# Altium footprint library WR-FPC_0.50mm.PcbLib: 147 footprints (part 2 of 10)
Each footprint in its own frame and in the unit in brackets; x right, y up, seen from the top. Pads: shape width x height; smd on the part's side, far side on the other; paste and mask are expansions set on the pad; w line width, h text height; cw(c..) or ccw(c..) is an arc to the next point about the centre after c.
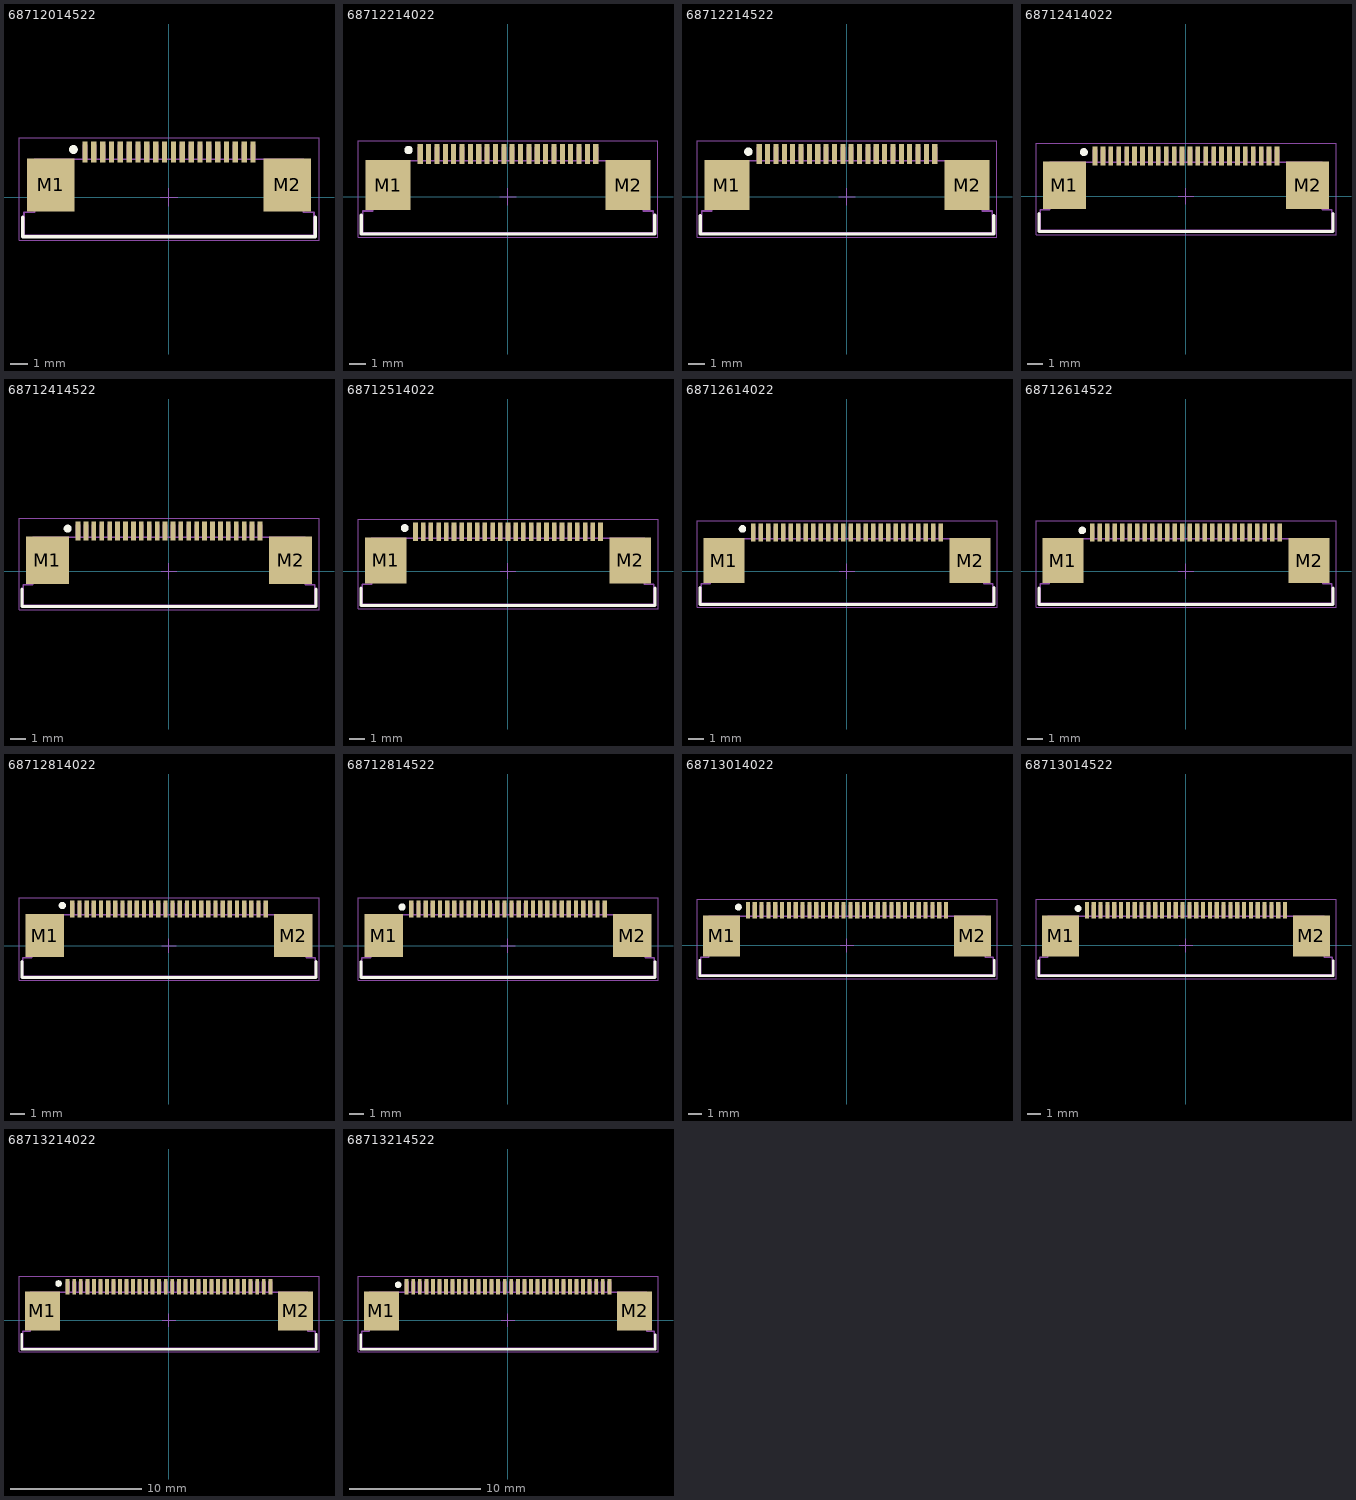
[diagram p1: the footprints below, top view; thin cyan lines are the x and y axes]

## 68712014522 [mm] "ZIF Connectors, Horizontal, Bottom Contact, pitch 0.5mm, 20p"
height 2.25
pads (22):
  rect 0.3x1.2 smd: 1(-4.75,2.56) 2(-4.25,2.56) 3(-3.75,2.56) 4(-3.25,2.56) 5(-2.75,2.56) 6(-2.25,2.56) 7(-1.75,2.56) 8(-1.25,2.56) 9(-0.75,2.56) 10(-0.25,2.56) 11(0.25,2.56) 12(0.75,2.56) 13(1.25,2.56) 14(1.75,2.56) 15(2.25,2.56) 16(2.75,2.56) 17(3.25,2.56) 18(3.75,2.56) 19(4.25,2.56) 20(4.75,2.56)
  rect 2.7x3 smd: M1(-6.68,0.7) M2(6.68,0.7)
Top Overlay:
  circle w0.25: c-5.4,2.7 r0.125
  lines w0.2: -8.275,-1.125 -8.275,-2.225 8.275,-2.225 8.275,-1.125
Top Designator:
  text ".Designator" at -7.498,-0.5 h1.5
Top Component Outline:
  lines w0.1: -4.85,2.15 -4.85,2.95 -4.65,2.95 -4.65,2.15 ; -4.35,2.15 -4.35,2.95 -4.15,2.95 -4.15,2.15 ; -3.85,2.15 -3.85,2.95 -3.65,2.95 -3.65,2.15 ; -3.35,2.15 -3.35,2.95 -3.15,2.95 -3.15,2.15 ; -2.85,2.15 -2.85,2.95 -2.65,2.95 -2.65,2.15 ; -2.35,2.15 -2.35,2.95 -2.15,2.95 -2.15,2.15 ; -1.85,2.15 -1.85,2.95 -1.65,2.95 -1.65,2.15 ; -1.35,2.15 -1.35,2.95 -1.15,2.95 -1.15,2.15 ; -0.85,2.15 -0.85,2.95 -0.65,2.95 -0.65,2.15 ; -0.35,2.15 -0.35,2.95 -0.15,2.95 -0.15,2.15 ; 0.15,2.15 0.15,2.95 0.35,2.95 0.35,2.15 ; 0.65,2.15 0.65,2.95 0.85,2.95 0.85,2.15 ; 1.15,2.15 1.15,2.95 1.35,2.95 1.35,2.15 ; 1.65,2.15 1.65,2.95 1.85,2.95 1.85,2.15 ; 2.15,2.15 2.15,2.95 2.35,2.95 2.35,2.15 ; 2.65,2.15 2.65,2.95 2.85,2.95 2.85,2.15 ; 3.15,2.15 3.15,2.95 3.35,2.95 3.35,2.15 ; 3.65,2.15 3.65,2.95 3.85,2.95 3.85,2.15 ; 4.15,2.15 4.15,2.95 4.35,2.95 4.35,2.15 ; 4.65,2.15 4.65,2.95 4.85,2.95 4.85,2.15 ; -8.2,-2.15 -8.2,-0.85 -7.6,-0.85 -7.6,2.15 7.6,2.15 7.6,-0.85 8.2,-0.85 8.2,-2.15 -8.2,-2.15
Top 3D Body:
  lines w0.1: -4.85,2.15 -4.85,2.95 -4.65,2.95 -4.65,2.15 ; -4.35,2.15 -4.35,2.95 -4.15,2.95 -4.15,2.15 ; -3.85,2.15 -3.85,2.95 -3.65,2.95 -3.65,2.15 ; -3.35,2.15 -3.35,2.95 -3.15,2.95 -3.15,2.15 ; -2.85,2.15 -2.85,2.95 -2.65,2.95 -2.65,2.15 ; -2.35,2.15 -2.35,2.95 -2.15,2.95 -2.15,2.15 ; -1.85,2.15 -1.85,2.95 -1.65,2.95 -1.65,2.15 ; -1.35,2.15 -1.35,2.95 -1.15,2.95 -1.15,2.15 ; -0.85,2.15 -0.85,2.95 -0.65,2.95 -0.65,2.15 ; -0.35,2.15 -0.35,2.95 -0.15,2.95 -0.15,2.15 ; 0.15,2.15 0.15,2.95 0.35,2.95 0.35,2.15 ; 0.65,2.15 0.65,2.95 0.85,2.95 0.85,2.15 ; 1.15,2.15 1.15,2.95 1.35,2.95 1.35,2.15 ; 1.65,2.15 1.65,2.95 1.85,2.95 1.85,2.15 ; 2.15,2.15 2.15,2.95 2.35,2.95 2.35,2.15 ; 2.65,2.15 2.65,2.95 2.85,2.95 2.85,2.15 ; 3.15,2.15 3.15,2.95 3.35,2.95 3.35,2.15 ; 3.65,2.15 3.65,2.95 3.85,2.95 3.85,2.15 ; 4.15,2.15 4.15,2.95 4.35,2.95 4.35,2.15 ; 4.65,2.15 4.65,2.95 4.85,2.95 4.85,2.15 ; -8.2,-2.15 8.2,-2.15 8.2,-0.85 7.6,-0.85 7.6,2.15 -7.6,2.15 -7.6,-0.85 -8.2,-0.85 -8.2,-2.15
Top Courtyard:
  lines w0.05: -0.5,0 0.5,0 ; 0,-0.5 0,0.5 ; -8.475,-2.425 8.475,-2.425 8.475,3.36 -8.475,3.36 -8.475,-2.425
3D body "68712014522.stp": height 2.1, standoff 0, extent -8.2,-2.15 8.2,2.95

## 68712214022 [mm] "ZIF Connectors, Horizontal, Top Contact, pitch 0.5mm, 22p"
height 2.25
pads (24):
  rect 0.3x1.2 smd: 1(-5.25,2.56) 2(-4.75,2.56) 3(-4.25,2.56) 4(-3.75,2.56) 5(-3.25,2.56) 6(-2.75,2.56) 7(-2.25,2.56) 8(-1.75,2.56) 9(-1.25,2.56) 10(-0.75,2.56) 11(-0.25,2.56) 12(0.25,2.56) 13(0.75,2.56) 14(1.25,2.56) 15(1.75,2.56) 16(2.25,2.56) 17(2.75,2.56) 18(3.25,2.56) 19(3.75,2.56) 20(4.25,2.56) 21(4.75,2.56) 22(5.25,2.56)
  rect 2.7x3 smd: M1(-7.18,0.7) M2(7.18,0.7)
Top Overlay:
  circle w0.25: c-5.95,2.8 r0.125
  lines w0.2: -8.775,-1.1 -8.775,-2.225 8.775,-2.225 8.775,-1.1
Top Designator:
  text ".Designator" at -7.498,-0.5 h1.5
Top Component Outline:
  lines w0.1: -5.35,2.15 -5.35,2.95 -5.15,2.95 -5.15,2.15 ; -4.85,2.15 -4.85,2.95 -4.65,2.95 -4.65,2.15 ; -4.35,2.15 -4.35,2.95 -4.15,2.95 -4.15,2.15 ; -3.85,2.15 -3.85,2.95 -3.65,2.95 -3.65,2.15 ; -3.35,2.15 -3.35,2.95 -3.15,2.95 -3.15,2.15 ; -2.85,2.15 -2.85,2.95 -2.65,2.95 -2.65,2.15 ; -2.35,2.15 -2.35,2.95 -2.15,2.95 -2.15,2.15 ; -1.85,2.15 -1.85,2.95 -1.65,2.95 -1.65,2.15 ; -1.35,2.15 -1.35,2.95 -1.15,2.95 -1.15,2.15 ; -0.85,2.15 -0.85,2.95 -0.65,2.95 -0.65,2.15 ; -0.35,2.15 -0.35,2.95 -0.15,2.95 -0.15,2.15 ; 0.15,2.15 0.15,2.95 0.35,2.95 0.35,2.15 ; 0.65,2.15 0.65,2.95 0.85,2.95 0.85,2.15 ; 1.15,2.15 1.15,2.95 1.35,2.95 1.35,2.15 ; 1.65,2.15 1.65,2.95 1.85,2.95 1.85,2.15 ; 2.15,2.15 2.15,2.95 2.35,2.95 2.35,2.15 ; 2.65,2.15 2.65,2.95 2.85,2.95 2.85,2.15 ; 3.15,2.15 3.15,2.95 3.35,2.95 3.35,2.15 ; 3.65,2.15 3.65,2.95 3.85,2.95 3.85,2.15 ; 4.15,2.15 4.15,2.95 4.35,2.95 4.35,2.15 ; 4.65,2.15 4.65,2.95 4.85,2.95 4.85,2.15 ; 5.15,2.15 5.15,2.95 5.35,2.95 5.35,2.15 ; -8.7,-2.15 -8.7,-0.85 -8.1,-0.85 -8.1,2.15 8.1,2.15 8.1,-0.85 8.7,-0.85 8.7,-2.15 -8.7,-2.15
Top 3D Body:
  lines w0.1: -5.35,2.15 -5.35,2.95 -5.15,2.95 -5.15,2.15 ; -4.85,2.15 -4.85,2.95 -4.65,2.95 -4.65,2.15 ; -4.35,2.15 -4.35,2.95 -4.15,2.95 -4.15,2.15 ; -3.85,2.15 -3.85,2.95 -3.65,2.95 -3.65,2.15 ; -3.35,2.15 -3.35,2.95 -3.15,2.95 -3.15,2.15 ; -2.85,2.15 -2.85,2.95 -2.65,2.95 -2.65,2.15 ; -2.35,2.15 -2.35,2.95 -2.15,2.95 -2.15,2.15 ; -1.85,2.15 -1.85,2.95 -1.65,2.95 -1.65,2.15 ; -1.35,2.15 -1.35,2.95 -1.15,2.95 -1.15,2.15 ; -0.85,2.15 -0.85,2.95 -0.65,2.95 -0.65,2.15 ; -0.35,2.15 -0.35,2.95 -0.15,2.95 -0.15,2.15 ; 0.15,2.15 0.15,2.95 0.35,2.95 0.35,2.15 ; 0.65,2.15 0.65,2.95 0.85,2.95 0.85,2.15 ; 1.15,2.15 1.15,2.95 1.35,2.95 1.35,2.15 ; 1.65,2.15 1.65,2.95 1.85,2.95 1.85,2.15 ; 2.15,2.15 2.15,2.95 2.35,2.95 2.35,2.15 ; 2.65,2.15 2.65,2.95 2.85,2.95 2.85,2.15 ; 3.15,2.15 3.15,2.95 3.35,2.95 3.35,2.15 ; 3.65,2.15 3.65,2.95 3.85,2.95 3.85,2.15 ; 4.15,2.15 4.15,2.95 4.35,2.95 4.35,2.15 ; 4.65,2.15 4.65,2.95 4.85,2.95 4.85,2.15 ; 5.15,2.15 5.15,2.95 5.35,2.95 5.35,2.15 ; -8.7,-2.15 8.7,-2.15 8.7,-0.85 8.1,-0.85 8.1,2.15 -8.1,2.15 -8.1,-0.85 -8.7,-0.85 -8.7,-2.15
Top Courtyard:
  lines w0.05: -0.5,0 0.5,0 ; 0,-0.5 0,0.5 ; -8.975,-2.425 -8.975,3.36 8.975,3.36 8.975,-2.425 -8.975,-2.425
3D body "68712214022.stp": height 2.1, standoff 0, extent -8.7,-2.15 8.7,2.95

## 68712214522 [mm] "ZIF Connectors, Horizontal, Bottom Contact, pitch 0.5mm, 22p"
height 2.25
pads (24):
  rect 0.3x1.2 smd: 1(-5.25,2.56) 2(-4.75,2.56) 3(-4.25,2.56) 4(-3.75,2.56) 5(-3.25,2.56) 6(-2.75,2.56) 7(-2.25,2.56) 8(-1.75,2.56) 9(-1.25,2.56) 10(-0.75,2.56) 11(-0.25,2.56) 12(0.25,2.56) 13(0.75,2.56) 14(1.25,2.56) 15(1.75,2.56) 16(2.25,2.56) 17(2.75,2.56) 18(3.25,2.56) 19(3.75,2.56) 20(4.25,2.56) 21(4.75,2.56) 22(5.25,2.56)
  rect 2.7x3 smd: M1(-7.18,0.7) M2(7.18,0.7)
Top Overlay:
  circle w0.25: c-5.9,2.7 r0.125
  lines w0.2: -8.775,-1.125 -8.775,-2.225 8.775,-2.225 8.775,-1.125
Top Designator:
  text ".Designator" at -7.498,-0.5 h1.5
Top Component Outline:
  lines w0.1: -5.35,2.15 -5.35,2.95 -5.15,2.95 -5.15,2.15 ; -4.85,2.15 -4.85,2.95 -4.65,2.95 -4.65,2.15 ; -4.35,2.15 -4.35,2.95 -4.15,2.95 -4.15,2.15 ; -3.85,2.15 -3.85,2.95 -3.65,2.95 -3.65,2.15 ; -3.35,2.15 -3.35,2.95 -3.15,2.95 -3.15,2.15 ; -2.85,2.15 -2.85,2.95 -2.65,2.95 -2.65,2.15 ; -2.35,2.15 -2.35,2.95 -2.15,2.95 -2.15,2.15 ; -1.85,2.15 -1.85,2.95 -1.65,2.95 -1.65,2.15 ; -1.35,2.15 -1.35,2.95 -1.15,2.95 -1.15,2.15 ; -0.85,2.15 -0.85,2.95 -0.65,2.95 -0.65,2.15 ; -0.35,2.15 -0.35,2.95 -0.15,2.95 -0.15,2.15 ; 0.15,2.15 0.15,2.95 0.35,2.95 0.35,2.15 ; 0.65,2.15 0.65,2.95 0.85,2.95 0.85,2.15 ; 1.15,2.15 1.15,2.95 1.35,2.95 1.35,2.15 ; 1.65,2.15 1.65,2.95 1.85,2.95 1.85,2.15 ; 2.15,2.15 2.15,2.95 2.35,2.95 2.35,2.15 ; 2.65,2.15 2.65,2.95 2.85,2.95 2.85,2.15 ; 3.15,2.15 3.15,2.95 3.35,2.95 3.35,2.15 ; 3.65,2.15 3.65,2.95 3.85,2.95 3.85,2.15 ; 4.15,2.15 4.15,2.95 4.35,2.95 4.35,2.15 ; 4.65,2.15 4.65,2.95 4.85,2.95 4.85,2.15 ; 5.15,2.15 5.15,2.95 5.35,2.95 5.35,2.15 ; -8.7,-2.15 -8.7,-0.85 -8.1,-0.85 -8.1,2.15 8.1,2.15 8.1,-0.85 8.7,-0.85 8.7,-2.15 -8.7,-2.15
Top 3D Body:
  lines w0.1: -5.35,2.15 -5.35,2.95 -5.15,2.95 -5.15,2.15 ; -4.85,2.15 -4.85,2.95 -4.65,2.95 -4.65,2.15 ; -4.35,2.15 -4.35,2.95 -4.15,2.95 -4.15,2.15 ; -3.85,2.15 -3.85,2.95 -3.65,2.95 -3.65,2.15 ; -3.35,2.15 -3.35,2.95 -3.15,2.95 -3.15,2.15 ; -2.85,2.15 -2.85,2.95 -2.65,2.95 -2.65,2.15 ; -2.35,2.15 -2.35,2.95 -2.15,2.95 -2.15,2.15 ; -1.85,2.15 -1.85,2.95 -1.65,2.95 -1.65,2.15 ; -1.35,2.15 -1.35,2.95 -1.15,2.95 -1.15,2.15 ; -0.85,2.15 -0.85,2.95 -0.65,2.95 -0.65,2.15 ; -0.35,2.15 -0.35,2.95 -0.15,2.95 -0.15,2.15 ; 0.15,2.15 0.15,2.95 0.35,2.95 0.35,2.15 ; 0.65,2.15 0.65,2.95 0.85,2.95 0.85,2.15 ; 1.15,2.15 1.15,2.95 1.35,2.95 1.35,2.15 ; 1.65,2.15 1.65,2.95 1.85,2.95 1.85,2.15 ; 2.15,2.15 2.15,2.95 2.35,2.95 2.35,2.15 ; 2.65,2.15 2.65,2.95 2.85,2.95 2.85,2.15 ; 3.15,2.15 3.15,2.95 3.35,2.95 3.35,2.15 ; 3.65,2.15 3.65,2.95 3.85,2.95 3.85,2.15 ; 4.15,2.15 4.15,2.95 4.35,2.95 4.35,2.15 ; 4.65,2.15 4.65,2.95 4.85,2.95 4.85,2.15 ; 5.15,2.15 5.15,2.95 5.35,2.95 5.35,2.15 ; -8.7,-2.15 8.7,-2.15 8.7,-0.85 8.1,-0.85 8.1,2.15 -8.1,2.15 -8.1,-0.85 -8.7,-0.85 -8.7,-2.15
Top Courtyard:
  lines w0.05: -0.5,0 0.5,0 ; 0,-0.5 0,0.5 ; -8.975,-2.425 8.975,-2.425 8.975,3.36 -8.975,3.36 -8.975,-2.425
3D body "68712214522.stp": height 2.1, standoff 0, extent -8.7,-2.15 8.7,2.95

## 68712414022 [mm] "ZIF Connectors, Horizontal, Top Contact, pitch 0.5mm, 24p"
height 2.25
pads (26):
  rect 0.3x1.2 smd: 1(-5.75,2.56) 2(-5.25,2.56) 3(-4.75,2.56) 4(-4.25,2.56) 5(-3.75,2.56) 6(-3.25,2.56) 7(-2.75,2.56) 8(-2.25,2.56) 9(-1.75,2.56) 10(-1.25,2.56) 11(-0.75,2.56) 12(-0.25,2.56) 13(0.25,2.56) 14(0.75,2.56) 15(1.25,2.56) 16(1.75,2.56) 17(2.25,2.56) 18(2.75,2.56) 19(3.25,2.56) 20(3.75,2.56) 21(4.25,2.56) 22(4.75,2.56) 23(5.25,2.56) 24(5.75,2.56)
  rect 2.7x3 smd: M1(-7.68,0.7) M2(7.68,0.7)
Top Overlay:
  circle w0.25: c-6.45,2.8 r0.125
  lines w0.2: -9.275,-1.1 -9.275,-2.225 9.275,-2.225 9.275,-1.1
Top Designator:
  text ".Designator" at -7.498,-0.5 h1.5
Top Component Outline:
  lines w0.1: -5.85,2.15 -5.85,2.95 -5.65,2.95 -5.65,2.15 ; -5.35,2.15 -5.35,2.95 -5.15,2.95 -5.15,2.15 ; -4.85,2.15 -4.85,2.95 -4.65,2.95 -4.65,2.15 ; -4.35,2.15 -4.35,2.95 -4.15,2.95 -4.15,2.15 ; -3.85,2.15 -3.85,2.95 -3.65,2.95 -3.65,2.15 ; -3.35,2.15 -3.35,2.95 -3.15,2.95 -3.15,2.15 ; -2.85,2.15 -2.85,2.95 -2.65,2.95 -2.65,2.15 ; -2.35,2.15 -2.35,2.95 -2.15,2.95 -2.15,2.15 ; -1.85,2.15 -1.85,2.95 -1.65,2.95 -1.65,2.15 ; -1.35,2.15 -1.35,2.95 -1.15,2.95 -1.15,2.15 ; -0.85,2.15 -0.85,2.95 -0.65,2.95 -0.65,2.15 ; -0.35,2.15 -0.35,2.95 -0.15,2.95 -0.15,2.15 ; 0.15,2.15 0.15,2.95 0.35,2.95 0.35,2.15 ; 0.65,2.15 0.65,2.95 0.85,2.95 0.85,2.15 ; 1.15,2.15 1.15,2.95 1.35,2.95 1.35,2.15 ; 1.65,2.15 1.65,2.95 1.85,2.95 1.85,2.15 ; 2.15,2.15 2.15,2.95 2.35,2.95 2.35,2.15 ; 2.65,2.15 2.65,2.95 2.85,2.95 2.85,2.15 ; 3.15,2.15 3.15,2.95 3.35,2.95 3.35,2.15 ; 3.65,2.15 3.65,2.95 3.85,2.95 3.85,2.15 ; 4.15,2.15 4.15,2.95 4.35,2.95 4.35,2.15 ; 4.65,2.15 4.65,2.95 4.85,2.95 4.85,2.15 ; 5.15,2.15 5.15,2.95 5.35,2.95 5.35,2.15 ; 5.65,2.15 5.65,2.95 5.85,2.95 5.85,2.15 ; -9.2,-2.15 -9.2,-0.85 -8.6,-0.85 -8.6,2.15 8.6,2.15 8.6,-0.85 9.2,-0.85 9.2,-2.15 -9.2,-2.15
Top 3D Body:
  lines w0.1: -5.85,2.15 -5.85,2.95 -5.65,2.95 -5.65,2.15 ; -5.35,2.15 -5.35,2.95 -5.15,2.95 -5.15,2.15 ; -4.85,2.15 -4.85,2.95 -4.65,2.95 -4.65,2.15 ; -4.35,2.15 -4.35,2.95 -4.15,2.95 -4.15,2.15 ; -3.85,2.15 -3.85,2.95 -3.65,2.95 -3.65,2.15 ; -3.35,2.15 -3.35,2.95 -3.15,2.95 -3.15,2.15 ; -2.85,2.15 -2.85,2.95 -2.65,2.95 -2.65,2.15 ; -2.35,2.15 -2.35,2.95 -2.15,2.95 -2.15,2.15 ; -1.85,2.15 -1.85,2.95 -1.65,2.95 -1.65,2.15 ; -1.35,2.15 -1.35,2.95 -1.15,2.95 -1.15,2.15 ; -0.85,2.15 -0.85,2.95 -0.65,2.95 -0.65,2.15 ; -0.35,2.15 -0.35,2.95 -0.15,2.95 -0.15,2.15 ; 0.15,2.15 0.15,2.95 0.35,2.95 0.35,2.15 ; 0.65,2.15 0.65,2.95 0.85,2.95 0.85,2.15 ; 1.15,2.15 1.15,2.95 1.35,2.95 1.35,2.15 ; 1.65,2.15 1.65,2.95 1.85,2.95 1.85,2.15 ; 2.15,2.15 2.15,2.95 2.35,2.95 2.35,2.15 ; 2.65,2.15 2.65,2.95 2.85,2.95 2.85,2.15 ; 3.15,2.15 3.15,2.95 3.35,2.95 3.35,2.15 ; 3.65,2.15 3.65,2.95 3.85,2.95 3.85,2.15 ; 4.15,2.15 4.15,2.95 4.35,2.95 4.35,2.15 ; 4.65,2.15 4.65,2.95 4.85,2.95 4.85,2.15 ; 5.15,2.15 5.15,2.95 5.35,2.95 5.35,2.15 ; 5.65,2.15 5.65,2.95 5.85,2.95 5.85,2.15 ; -9.2,-2.15 9.2,-2.15 9.2,-0.85 8.6,-0.85 8.6,2.15 -8.6,2.15 -8.6,-0.85 -9.2,-0.85 -9.2,-2.15
Top Courtyard:
  lines w0.05: -0.5,0 0.5,0 ; 0,-0.5 0,0.5 ; -9.475,-2.425 -9.475,3.36 9.475,3.36 9.475,-2.425 -9.475,-2.425
3D body "68712414022.stp": height 2.1, standoff 0, extent -9.2,-2.15 9.2,2.95

## 68712414522 [mm] "ZIF Connectors, Horizontal, Bottom Contact, pitch 0.5mm, 24p"
height 2.25
pads (26):
  rect 0.3x1.2 smd: 1(-5.75,2.56) 2(-5.25,2.56) 3(-4.75,2.56) 4(-4.25,2.56) 5(-3.75,2.56) 6(-3.25,2.56) 7(-2.75,2.56) 8(-2.25,2.56) 9(-1.75,2.56) 10(-1.25,2.56) 11(-0.75,2.56) 12(-0.25,2.56) 13(0.25,2.56) 14(0.75,2.56) 15(1.25,2.56) 16(1.75,2.56) 17(2.25,2.56) 18(2.75,2.56) 19(3.25,2.56) 20(3.75,2.56) 21(4.25,2.56) 22(4.75,2.56) 23(5.25,2.56) 24(5.75,2.56)
  rect 2.7x3 smd: M1(-7.68,0.7) M2(7.68,0.7)
Top Overlay:
  circle w0.25: c-6.4,2.7 r0.125
  lines w0.2: -9.275,-1.125 -9.275,-2.225 9.275,-2.225 9.275,-1.125
Top Designator:
  text ".Designator" at -7.498,-0.5 h1.5
Top Component Outline:
  lines w0.1: -5.85,2.15 -5.85,2.95 -5.65,2.95 -5.65,2.15 ; -5.35,2.15 -5.35,2.95 -5.15,2.95 -5.15,2.15 ; -4.85,2.15 -4.85,2.95 -4.65,2.95 -4.65,2.15 ; -4.35,2.15 -4.35,2.95 -4.15,2.95 -4.15,2.15 ; -3.85,2.15 -3.85,2.95 -3.65,2.95 -3.65,2.15 ; -3.35,2.15 -3.35,2.95 -3.15,2.95 -3.15,2.15 ; -2.85,2.15 -2.85,2.95 -2.65,2.95 -2.65,2.15 ; -2.35,2.15 -2.35,2.95 -2.15,2.95 -2.15,2.15 ; -1.85,2.15 -1.85,2.95 -1.65,2.95 -1.65,2.15 ; -1.35,2.15 -1.35,2.95 -1.15,2.95 -1.15,2.15 ; -0.85,2.15 -0.85,2.95 -0.65,2.95 -0.65,2.15 ; -0.35,2.15 -0.35,2.95 -0.15,2.95 -0.15,2.15 ; 0.15,2.15 0.15,2.95 0.35,2.95 0.35,2.15 ; 0.65,2.15 0.65,2.95 0.85,2.95 0.85,2.15 ; 1.15,2.15 1.15,2.95 1.35,2.95 1.35,2.15 ; 1.65,2.15 1.65,2.95 1.85,2.95 1.85,2.15 ; 2.15,2.15 2.15,2.95 2.35,2.95 2.35,2.15 ; 2.65,2.15 2.65,2.95 2.85,2.95 2.85,2.15 ; 3.15,2.15 3.15,2.95 3.35,2.95 3.35,2.15 ; 3.65,2.15 3.65,2.95 3.85,2.95 3.85,2.15 ; 4.15,2.15 4.15,2.95 4.35,2.95 4.35,2.15 ; 4.65,2.15 4.65,2.95 4.85,2.95 4.85,2.15 ; 5.15,2.15 5.15,2.95 5.35,2.95 5.35,2.15 ; 5.65,2.15 5.65,2.95 5.85,2.95 5.85,2.15 ; -9.2,-2.15 9.2,-2.15 9.2,-0.85 8.6,-0.85 8.6,2.15 -8.6,2.15 -8.6,-0.85 -9.2,-0.85 -9.2,-2.15
Top 3D Body:
  lines w0.1: -5.85,2.15 -5.85,2.95 -5.65,2.95 -5.65,2.15 ; -5.35,2.15 -5.35,2.95 -5.15,2.95 -5.15,2.15 ; -4.85,2.15 -4.85,2.95 -4.65,2.95 -4.65,2.15 ; -4.35,2.15 -4.35,2.95 -4.15,2.95 -4.15,2.15 ; -3.85,2.15 -3.85,2.95 -3.65,2.95 -3.65,2.15 ; -3.35,2.15 -3.35,2.95 -3.15,2.95 -3.15,2.15 ; -2.85,2.15 -2.85,2.95 -2.65,2.95 -2.65,2.15 ; -2.35,2.15 -2.35,2.95 -2.15,2.95 -2.15,2.15 ; -1.85,2.15 -1.85,2.95 -1.65,2.95 -1.65,2.15 ; -1.35,2.15 -1.35,2.95 -1.15,2.95 -1.15,2.15 ; -0.85,2.15 -0.85,2.95 -0.65,2.95 -0.65,2.15 ; -0.35,2.15 -0.35,2.95 -0.15,2.95 -0.15,2.15 ; 0.15,2.15 0.15,2.95 0.35,2.95 0.35,2.15 ; 0.65,2.15 0.65,2.95 0.85,2.95 0.85,2.15 ; 1.15,2.15 1.15,2.95 1.35,2.95 1.35,2.15 ; 1.65,2.15 1.65,2.95 1.85,2.95 1.85,2.15 ; 2.15,2.15 2.15,2.95 2.35,2.95 2.35,2.15 ; 2.65,2.15 2.65,2.95 2.85,2.95 2.85,2.15 ; 3.15,2.15 3.15,2.95 3.35,2.95 3.35,2.15 ; 3.65,2.15 3.65,2.95 3.85,2.95 3.85,2.15 ; 4.15,2.15 4.15,2.95 4.35,2.95 4.35,2.15 ; 4.65,2.15 4.65,2.95 4.85,2.95 4.85,2.15 ; 5.15,2.15 5.15,2.95 5.35,2.95 5.35,2.15 ; 5.65,2.15 5.65,2.95 5.85,2.95 5.85,2.15 ; -9.2,-2.15 -9.2,-0.85 -8.6,-0.85 -8.6,2.15 8.6,2.15 8.6,-0.85 9.2,-0.85 9.2,-2.15 -9.2,-2.15
Top Courtyard:
  lines w0.05: -0.5,0 0.5,0 ; 0,-0.5 0,0.5 ; -9.475,-2.425 -9.475,3.36 9.475,3.36 9.475,-2.425 -9.475,-2.425
3D body "68712414522.stp": height 2.1, standoff 0, extent -9.2,-2.15 9.2,2.95

## 68712514022 [mm] "ZIF Connectors, Horizontal, Top Contact, pitch 0.5mm, 25p"
height 2.25
pads (27):
  rect 0.3x1.2 smd: 1(-6,2.56) 2(-5.5,2.56) 3(-5,2.56) 4(-4.5,2.56) 5(-4,2.56) 6(-3.5,2.56) 7(-3,2.56) 8(-2.5,2.56) 9(-2,2.56) 10(-1.5,2.56) 11(-1,2.56) 12(-0.5,2.56) 13(0,2.56) 14(0.5,2.56) 15(1,2.56) 16(1.5,2.56) 17(2,2.56) 18(2.5,2.56) 19(3,2.56) 20(3.5,2.56) 21(4,2.56) 22(4.5,2.56) 23(5,2.56) 24(5.5,2.56) 25(6,2.56)
  rect 2.7x3 smd: M1(-7.93,0.7) M2(7.93,0.7)
Top Overlay:
  circle w0.25: c-6.7,2.8 r0.125
  lines w0.2: -9.525,-1.1 -9.525,-2.225 9.525,-2.225 9.525,-1.1
Top Designator:
  text ".Designator" at -7.498,-0.5 h1.5
Top Component Outline:
  lines w0.1: -6.1,2.15 -6.1,2.95 -5.9,2.95 -5.9,2.15 ; -5.6,2.15 -5.6,2.95 -5.4,2.95 -5.4,2.15 ; -5.1,2.15 -5.1,2.95 -4.9,2.95 -4.9,2.15 ; -4.6,2.15 -4.6,2.95 -4.4,2.95 -4.4,2.15 ; -4.1,2.15 -4.1,2.95 -3.9,2.95 -3.9,2.15 ; -3.6,2.15 -3.6,2.95 -3.4,2.95 -3.4,2.15 ; -3.1,2.15 -3.1,2.95 -2.9,2.95 -2.9,2.15 ; -2.6,2.15 -2.6,2.95 -2.4,2.95 -2.4,2.15 ; -2.1,2.15 -2.1,2.95 -1.9,2.95 -1.9,2.15 ; -1.6,2.15 -1.6,2.95 -1.4,2.95 -1.4,2.15 ; -1.1,2.15 -1.1,2.95 -0.9,2.95 -0.9,2.15 ; -0.6,2.15 -0.6,2.95 -0.4,2.95 -0.4,2.15 ; -0.1,2.15 -0.1,2.95 0.1,2.95 0.1,2.15 ; 0.4,2.15 0.4,2.95 0.6,2.95 0.6,2.15 ; 0.9,2.15 0.9,2.95 1.1,2.95 1.1,2.15 ; 1.4,2.15 1.4,2.95 1.6,2.95 1.6,2.15 ; 1.9,2.15 1.9,2.95 2.1,2.95 2.1,2.15 ; 2.4,2.15 2.4,2.95 2.6,2.95 2.6,2.15 ; 2.9,2.15 2.9,2.95 3.1,2.95 3.1,2.15 ; 3.4,2.15 3.4,2.95 3.6,2.95 3.6,2.15 ; 3.9,2.15 3.9,2.95 4.1,2.95 4.1,2.15 ; 4.4,2.15 4.4,2.95 4.6,2.95 4.6,2.15 ; 4.9,2.15 4.9,2.95 5.1,2.95 5.1,2.15 ; 5.4,2.15 5.4,2.95 5.6,2.95 5.6,2.15 ; 5.9,2.15 5.9,2.95 6.1,2.95 6.1,2.15 ; -9.45,-2.15 -9.45,-0.85 -8.85,-0.85 -8.85,2.15 8.85,2.15 8.85,-0.85 9.45,-0.85 9.45,-2.15 -9.45,-2.15
Top 3D Body:
  lines w0.1: -6.1,2.15 -6.1,2.95 -5.9,2.95 -5.9,2.15 ; -5.6,2.15 -5.6,2.95 -5.4,2.95 -5.4,2.15 ; -5.1,2.15 -5.1,2.95 -4.9,2.95 -4.9,2.15 ; -4.6,2.15 -4.6,2.95 -4.4,2.95 -4.4,2.15 ; -4.1,2.15 -4.1,2.95 -3.9,2.95 -3.9,2.15 ; -3.6,2.15 -3.6,2.95 -3.4,2.95 -3.4,2.15 ; -3.1,2.15 -3.1,2.95 -2.9,2.95 -2.9,2.15 ; -2.6,2.15 -2.6,2.95 -2.4,2.95 -2.4,2.15 ; -2.1,2.15 -2.1,2.95 -1.9,2.95 -1.9,2.15 ; -1.6,2.15 -1.6,2.95 -1.4,2.95 -1.4,2.15 ; -1.1,2.15 -1.1,2.95 -0.9,2.95 -0.9,2.15 ; -0.6,2.15 -0.6,2.95 -0.4,2.95 -0.4,2.15 ; -0.1,2.15 -0.1,2.95 0.1,2.95 0.1,2.15 ; 0.4,2.15 0.4,2.95 0.6,2.95 0.6,2.15 ; 0.9,2.15 0.9,2.95 1.1,2.95 1.1,2.15 ; 1.4,2.15 1.4,2.95 1.6,2.95 1.6,2.15 ; 1.9,2.15 1.9,2.95 2.1,2.95 2.1,2.15 ; 2.4,2.15 2.4,2.95 2.6,2.95 2.6,2.15 ; 2.9,2.15 2.9,2.95 3.1,2.95 3.1,2.15 ; 3.4,2.15 3.4,2.95 3.6,2.95 3.6,2.15 ; 3.9,2.15 3.9,2.95 4.1,2.95 4.1,2.15 ; 4.4,2.15 4.4,2.95 4.6,2.95 4.6,2.15 ; 4.9,2.15 4.9,2.95 5.1,2.95 5.1,2.15 ; 5.4,2.15 5.4,2.95 5.6,2.95 5.6,2.15 ; 5.9,2.15 5.9,2.95 6.1,2.95 6.1,2.15 ; -9.45,-2.15 9.45,-2.15 9.45,-0.85 8.85,-0.85 8.85,2.15 -8.85,2.15 -8.85,-0.85 -9.45,-0.85 -9.45,-2.15
Top Courtyard:
  lines w0.05: -0.5,0 0.5,0 ; 0,-0.5 0,0.5 ; -9.725,-2.425 -9.725,3.36 9.725,3.36 9.725,-2.425 -9.725,-2.425
3D body "68712514022.stp": height 2.1, standoff 0, extent -9.45,-2.15 9.45,2.95

## 68712614022 [mm] "ZIF Connectors, Horizontal, Top Contact, pitch 0.5mm, 26p"
height 2.25
pads (28):
  rect 0.3x1.2 smd: 1(-6.25,2.56) 2(-5.75,2.56) 3(-5.25,2.56) 4(-4.75,2.56) 5(-4.25,2.56) 6(-3.75,2.56) 7(-3.25,2.56) 8(-2.75,2.56) 9(-2.25,2.56) 10(-1.75,2.56) 11(-1.25,2.56) 12(-0.75,2.56) 13(-0.25,2.56) 14(0.25,2.56) 15(0.75,2.56) 16(1.25,2.56) 17(1.75,2.56) 18(2.25,2.56) 19(2.75,2.56) 20(3.25,2.56) 21(3.75,2.56) 22(4.25,2.56) 23(4.75,2.56) 24(5.25,2.56) 25(5.75,2.56) 26(6.25,2.56)
  rect 2.7x3 smd: M1(-8.18,0.7) M2(8.18,0.7)
Top Overlay:
  circle w0.25: c-6.95,2.8 r0.125
  lines w0.2: -9.775,-1.1 -9.775,-2.225 9.775,-2.225 9.775,-1.1
Top Designator:
  text ".Designator" at -7.498,-0.5 h1.5
Top Component Outline:
  lines w0.1: -6.35,2.15 -6.35,2.95 -6.15,2.95 -6.15,2.15 ; -5.85,2.15 -5.85,2.95 -5.65,2.95 -5.65,2.15 ; -5.35,2.15 -5.35,2.95 -5.15,2.95 -5.15,2.15 ; -4.85,2.15 -4.85,2.95 -4.65,2.95 -4.65,2.15 ; -4.35,2.15 -4.35,2.95 -4.15,2.95 -4.15,2.15 ; -3.85,2.15 -3.85,2.95 -3.65,2.95 -3.65,2.15 ; -3.35,2.15 -3.35,2.95 -3.15,2.95 -3.15,2.15 ; -2.85,2.15 -2.85,2.95 -2.65,2.95 -2.65,2.15 ; -2.35,2.15 -2.35,2.95 -2.15,2.95 -2.15,2.15 ; -1.85,2.15 -1.85,2.95 -1.65,2.95 -1.65,2.15 ; -1.35,2.15 -1.35,2.95 -1.15,2.95 -1.15,2.15 ; -0.85,2.15 -0.85,2.95 -0.65,2.95 -0.65,2.15 ; -0.35,2.15 -0.35,2.95 -0.15,2.95 -0.15,2.15 ; 0.15,2.15 0.15,2.95 0.35,2.95 0.35,2.15 ; 0.65,2.15 0.65,2.95 0.85,2.95 0.85,2.15 ; 1.15,2.15 1.15,2.95 1.35,2.95 1.35,2.15 ; 1.65,2.15 1.65,2.95 1.85,2.95 1.85,2.15 ; 2.15,2.15 2.15,2.95 2.35,2.95 2.35,2.15 ; 2.65,2.15 2.65,2.95 2.85,2.95 2.85,2.15 ; 3.15,2.15 3.15,2.95 3.35,2.95 3.35,2.15 ; 3.65,2.15 3.65,2.95 3.85,2.95 3.85,2.15 ; 4.15,2.15 4.15,2.95 4.35,2.95 4.35,2.15 ; 4.65,2.15 4.65,2.95 4.85,2.95 4.85,2.15 ; 5.15,2.15 5.15,2.95 5.35,2.95 5.35,2.15 ; 5.65,2.15 5.65,2.95 5.85,2.95 5.85,2.15 ; 6.15,2.15 6.15,2.95 6.35,2.95 6.35,2.15 ; -9.7,-2.15 9.7,-2.15 9.7,-0.85 9.1,-0.85 9.1,2.15 -9.1,2.15 -9.1,-0.85 -9.7,-0.85 -9.7,-2.15
Top 3D Body:
  lines w0.1: -6.35,2.15 -6.35,2.95 -6.15,2.95 -6.15,2.15 ; -5.85,2.15 -5.85,2.95 -5.65,2.95 -5.65,2.15 ; -5.35,2.15 -5.35,2.95 -5.15,2.95 -5.15,2.15 ; -4.85,2.15 -4.85,2.95 -4.65,2.95 -4.65,2.15 ; -4.35,2.15 -4.35,2.95 -4.15,2.95 -4.15,2.15 ; -3.85,2.15 -3.85,2.95 -3.65,2.95 -3.65,2.15 ; -3.35,2.15 -3.35,2.95 -3.15,2.95 -3.15,2.15 ; -2.85,2.15 -2.85,2.95 -2.65,2.95 -2.65,2.15 ; -2.35,2.15 -2.35,2.95 -2.15,2.95 -2.15,2.15 ; -1.85,2.15 -1.85,2.95 -1.65,2.95 -1.65,2.15 ; -1.35,2.15 -1.35,2.95 -1.15,2.95 -1.15,2.15 ; -0.85,2.15 -0.85,2.95 -0.65,2.95 -0.65,2.15 ; -0.35,2.15 -0.35,2.95 -0.15,2.95 -0.15,2.15 ; 0.15,2.15 0.15,2.95 0.35,2.95 0.35,2.15 ; 0.65,2.15 0.65,2.95 0.85,2.95 0.85,2.15 ; 1.15,2.15 1.15,2.95 1.35,2.95 1.35,2.15 ; 1.65,2.15 1.65,2.95 1.85,2.95 1.85,2.15 ; 2.15,2.15 2.15,2.95 2.35,2.95 2.35,2.15 ; 2.65,2.15 2.65,2.95 2.85,2.95 2.85,2.15 ; 3.15,2.15 3.15,2.95 3.35,2.95 3.35,2.15 ; 3.65,2.15 3.65,2.95 3.85,2.95 3.85,2.15 ; 4.15,2.15 4.15,2.95 4.35,2.95 4.35,2.15 ; 4.65,2.15 4.65,2.95 4.85,2.95 4.85,2.15 ; 5.15,2.15 5.15,2.95 5.35,2.95 5.35,2.15 ; 5.65,2.15 5.65,2.95 5.85,2.95 5.85,2.15 ; 6.15,2.15 6.15,2.95 6.35,2.95 6.35,2.15 ; -9.7,-2.15 -9.7,-0.85 -9.1,-0.85 -9.1,2.15 9.1,2.15 9.1,-0.85 9.7,-0.85 9.7,-2.15 -9.7,-2.15
Top Courtyard:
  lines w0.05: -0.5,0 0.5,0 ; 0,-0.5 0,0.5 ; -9.975,-2.425 9.975,-2.425 9.975,3.36 -9.975,3.36 -9.975,-2.425
3D body "68712614022.stp": height 2.1, standoff 0, extent -9.7,-2.15 9.7,2.95

## 68712614522 [mm] "ZIF Connectors, Horizontal, Bottom Contact, pitch 0.5mm, 26p"
height 2.25
pads (28):
  rect 0.3x1.2 smd: 1(-6.25,2.56) 2(-5.75,2.56) 3(-5.25,2.56) 4(-4.75,2.56) 5(-4.25,2.56) 6(-3.75,2.56) 7(-3.25,2.56) 8(-2.75,2.56) 9(-2.25,2.56) 10(-1.75,2.56) 11(-1.25,2.56) 12(-0.75,2.56) 13(-0.25,2.56) 14(0.25,2.56) 15(0.75,2.56) 16(1.25,2.56) 17(1.75,2.56) 18(2.25,2.56) 19(2.75,2.56) 20(3.25,2.56) 21(3.75,2.56) 22(4.25,2.56) 23(4.75,2.56) 24(5.25,2.56) 25(5.75,2.56) 26(6.25,2.56)
  rect 2.7x3 smd: M1(-8.18,0.7) M2(8.18,0.7)
Top Overlay:
  circle w0.25: c-6.9,2.7 r0.125
  lines w0.2: -9.775,-1.125 -9.775,-2.225 9.775,-2.225 9.775,-1.125
Top Designator:
  text ".Designator" at -7.498,-0.5 h1.5
Top Component Outline:
  lines w0.1: -6.35,2.15 -6.35,2.95 -6.15,2.95 -6.15,2.15 ; -5.85,2.15 -5.85,2.95 -5.65,2.95 -5.65,2.15 ; -5.35,2.15 -5.35,2.95 -5.15,2.95 -5.15,2.15 ; -4.85,2.15 -4.85,2.95 -4.65,2.95 -4.65,2.15 ; -4.35,2.15 -4.35,2.95 -4.15,2.95 -4.15,2.15 ; -3.85,2.15 -3.85,2.95 -3.65,2.95 -3.65,2.15 ; -3.35,2.15 -3.35,2.95 -3.15,2.95 -3.15,2.15 ; -2.85,2.15 -2.85,2.95 -2.65,2.95 -2.65,2.15 ; -2.35,2.15 -2.35,2.95 -2.15,2.95 -2.15,2.15 ; -1.85,2.15 -1.85,2.95 -1.65,2.95 -1.65,2.15 ; -1.35,2.15 -1.35,2.95 -1.15,2.95 -1.15,2.15 ; -0.85,2.15 -0.85,2.95 -0.65,2.95 -0.65,2.15 ; -0.35,2.15 -0.35,2.95 -0.15,2.95 -0.15,2.15 ; 0.15,2.15 0.15,2.95 0.35,2.95 0.35,2.15 ; 0.65,2.15 0.65,2.95 0.85,2.95 0.85,2.15 ; 1.15,2.15 1.15,2.95 1.35,2.95 1.35,2.15 ; 1.65,2.15 1.65,2.95 1.85,2.95 1.85,2.15 ; 2.15,2.15 2.15,2.95 2.35,2.95 2.35,2.15 ; 2.65,2.15 2.65,2.95 2.85,2.95 2.85,2.15 ; 3.15,2.15 3.15,2.95 3.35,2.95 3.35,2.15 ; 3.65,2.15 3.65,2.95 3.85,2.95 3.85,2.15 ; 4.15,2.15 4.15,2.95 4.35,2.95 4.35,2.15 ; 4.65,2.15 4.65,2.95 4.85,2.95 4.85,2.15 ; 5.15,2.15 5.15,2.95 5.35,2.95 5.35,2.15 ; 5.65,2.15 5.65,2.95 5.85,2.95 5.85,2.15 ; 6.15,2.15 6.15,2.95 6.35,2.95 6.35,2.15 ; -9.7,-2.15 -9.7,-0.85 -9.1,-0.85 -9.1,2.15 9.1,2.15 9.1,-0.85 9.7,-0.85 9.7,-2.15 -9.7,-2.15
Top 3D Body:
  lines w0.1: -6.35,2.15 -6.35,2.95 -6.15,2.95 -6.15,2.15 ; -5.85,2.15 -5.85,2.95 -5.65,2.95 -5.65,2.15 ; -5.35,2.15 -5.35,2.95 -5.15,2.95 -5.15,2.15 ; -4.85,2.15 -4.85,2.95 -4.65,2.95 -4.65,2.15 ; -4.35,2.15 -4.35,2.95 -4.15,2.95 -4.15,2.15 ; -3.85,2.15 -3.85,2.95 -3.65,2.95 -3.65,2.15 ; -3.35,2.15 -3.35,2.95 -3.15,2.95 -3.15,2.15 ; -2.85,2.15 -2.85,2.95 -2.65,2.95 -2.65,2.15 ; -2.35,2.15 -2.35,2.95 -2.15,2.95 -2.15,2.15 ; -1.85,2.15 -1.85,2.95 -1.65,2.95 -1.65,2.15 ; -1.35,2.15 -1.35,2.95 -1.15,2.95 -1.15,2.15 ; -0.85,2.15 -0.85,2.95 -0.65,2.95 -0.65,2.15 ; -0.35,2.15 -0.35,2.95 -0.15,2.95 -0.15,2.15 ; 0.15,2.15 0.15,2.95 0.35,2.95 0.35,2.15 ; 0.65,2.15 0.65,2.95 0.85,2.95 0.85,2.15 ; 1.15,2.15 1.15,2.95 1.35,2.95 1.35,2.15 ; 1.65,2.15 1.65,2.95 1.85,2.95 1.85,2.15 ; 2.15,2.15 2.15,2.95 2.35,2.95 2.35,2.15 ; 2.65,2.15 2.65,2.95 2.85,2.95 2.85,2.15 ; 3.15,2.15 3.15,2.95 3.35,2.95 3.35,2.15 ; 3.65,2.15 3.65,2.95 3.85,2.95 3.85,2.15 ; 4.15,2.15 4.15,2.95 4.35,2.95 4.35,2.15 ; 4.65,2.15 4.65,2.95 4.85,2.95 4.85,2.15 ; 5.15,2.15 5.15,2.95 5.35,2.95 5.35,2.15 ; 5.65,2.15 5.65,2.95 5.85,2.95 5.85,2.15 ; 6.15,2.15 6.15,2.95 6.35,2.95 6.35,2.15 ; -9.7,-2.15 9.7,-2.15 9.7,-0.85 9.1,-0.85 9.1,2.15 -9.1,2.15 -9.1,-0.85 -9.7,-0.85 -9.7,-2.15
Top Courtyard:
  lines w0.05: -0.5,0 0.5,0 ; 0,-0.5 0,0.5 ; -9.975,-2.425 9.975,-2.425 9.975,3.36 -9.975,3.36 -9.975,-2.425
3D body "68712614522.stp": height 2.1, standoff 0, extent -9.7,-2.15 9.7,2.95

## 68712814022 [mm] "ZIF Connectors, Horizontal, Top Contact, pitch 0.5mm, 28p"
height 2.25
pads (30):
  rect 0.3x1.2 smd: 1(-6.75,2.56) 2(-6.25,2.56) 3(-5.75,2.56) 4(-5.25,2.56) 5(-4.75,2.56) 6(-4.25,2.56) 7(-3.75,2.56) 8(-3.25,2.56) 9(-2.75,2.56) 10(-2.25,2.56) 11(-1.75,2.56) 12(-1.25,2.56) 13(-0.75,2.56) 14(-0.25,2.56) 15(0.25,2.56) 16(0.75,2.56) 17(1.25,2.56) 18(1.75,2.56) 19(2.25,2.56) 20(2.75,2.56) 21(3.25,2.56) 22(3.75,2.56) 23(4.25,2.56) 24(4.75,2.56) 25(5.25,2.56) 26(5.75,2.56) 27(6.25,2.56) 28(6.75,2.56)
  rect 2.7x3 smd: M1(-8.68,0.7) M2(8.68,0.7)
Top Overlay:
  circle w0.25: c-7.45,2.8 r0.125
  lines w0.2: -10.275,-1.1 -10.275,-2.225 10.275,-2.225 10.275,-1.1
Top Designator:
  text ".Designator" at -7.498,-0.5 h1.5
Top Component Outline:
  lines w0.1: -6.85,2.15 -6.85,2.95 -6.65,2.95 -6.65,2.15 ; -6.35,2.15 -6.35,2.95 -6.15,2.95 -6.15,2.15 ; -5.85,2.15 -5.85,2.95 -5.65,2.95 -5.65,2.15 ; -5.35,2.15 -5.35,2.95 -5.15,2.95 -5.15,2.15 ; -4.85,2.15 -4.85,2.95 -4.65,2.95 -4.65,2.15 ; -4.35,2.15 -4.35,2.95 -4.15,2.95 -4.15,2.15 ; -3.85,2.15 -3.85,2.95 -3.65,2.95 -3.65,2.15 ; -3.35,2.15 -3.35,2.95 -3.15,2.95 -3.15,2.15 ; -2.85,2.15 -2.85,2.95 -2.65,2.95 -2.65,2.15 ; -2.35,2.15 -2.35,2.95 -2.15,2.95 -2.15,2.15 ; -1.85,2.15 -1.85,2.95 -1.65,2.95 -1.65,2.15 ; -1.35,2.15 -1.35,2.95 -1.15,2.95 -1.15,2.15 ; -0.85,2.15 -0.85,2.95 -0.65,2.95 -0.65,2.15 ; -0.35,2.15 -0.35,2.95 -0.15,2.95 -0.15,2.15 ; 0.15,2.15 0.15,2.95 0.35,2.95 0.35,2.15 ; 0.65,2.15 0.65,2.95 0.85,2.95 0.85,2.15 ; 1.15,2.15 1.15,2.95 1.35,2.95 1.35,2.15 ; 1.65,2.15 1.65,2.95 1.85,2.95 1.85,2.15 ; 2.15,2.15 2.15,2.95 2.35,2.95 2.35,2.15 ; 2.65,2.15 2.65,2.95 2.85,2.95 2.85,2.15 ; 3.15,2.15 3.15,2.95 3.35,2.95 3.35,2.15 ; 3.65,2.15 3.65,2.95 3.85,2.95 3.85,2.15 ; 4.15,2.15 4.15,2.95 4.35,2.95 4.35,2.15 ; 4.65,2.15 4.65,2.95 4.85,2.95 4.85,2.15 ; 5.15,2.15 5.15,2.95 5.35,2.95 5.35,2.15 ; 5.65,2.15 5.65,2.95 5.85,2.95 5.85,2.15 ; 6.15,2.15 6.15,2.95 6.35,2.95 6.35,2.15 ; 6.65,2.15 6.65,2.95 6.85,2.95 6.85,2.15 ; -10.2,-2.15 10.2,-2.15 10.2,-0.85 9.6,-0.85 9.6,2.15 -9.6,2.15 -9.6,-0.85 -10.2,-0.85 -10.2,-2.15
Top 3D Body:
  lines w0.1: -6.85,2.15 -6.85,2.95 -6.65,2.95 -6.65,2.15 ; -6.35,2.15 -6.35,2.95 -6.15,2.95 -6.15,2.15 ; -5.85,2.15 -5.85,2.95 -5.65,2.95 -5.65,2.15 ; -5.35,2.15 -5.35,2.95 -5.15,2.95 -5.15,2.15 ; -4.85,2.15 -4.85,2.95 -4.65,2.95 -4.65,2.15 ; -4.35,2.15 -4.35,2.95 -4.15,2.95 -4.15,2.15 ; -3.85,2.15 -3.85,2.95 -3.65,2.95 -3.65,2.15 ; -3.35,2.15 -3.35,2.95 -3.15,2.95 -3.15,2.15 ; -2.85,2.15 -2.85,2.95 -2.65,2.95 -2.65,2.15 ; -2.35,2.15 -2.35,2.95 -2.15,2.95 -2.15,2.15 ; -1.85,2.15 -1.85,2.95 -1.65,2.95 -1.65,2.15 ; -1.35,2.15 -1.35,2.95 -1.15,2.95 -1.15,2.15 ; -0.85,2.15 -0.85,2.95 -0.65,2.95 -0.65,2.15 ; -0.35,2.15 -0.35,2.95 -0.15,2.95 -0.15,2.15 ; 0.15,2.15 0.15,2.95 0.35,2.95 0.35,2.15 ; 0.65,2.15 0.65,2.95 0.85,2.95 0.85,2.15 ; 1.15,2.15 1.15,2.95 1.35,2.95 1.35,2.15 ; 1.65,2.15 1.65,2.95 1.85,2.95 1.85,2.15 ; 2.15,2.15 2.15,2.95 2.35,2.95 2.35,2.15 ; 2.65,2.15 2.65,2.95 2.85,2.95 2.85,2.15 ; 3.15,2.15 3.15,2.95 3.35,2.95 3.35,2.15 ; 3.65,2.15 3.65,2.95 3.85,2.95 3.85,2.15 ; 4.15,2.15 4.15,2.95 4.35,2.95 4.35,2.15 ; 4.65,2.15 4.65,2.95 4.85,2.95 4.85,2.15 ; 5.15,2.15 5.15,2.95 5.35,2.95 5.35,2.15 ; 5.65,2.15 5.65,2.95 5.85,2.95 5.85,2.15 ; 6.15,2.15 6.15,2.95 6.35,2.95 6.35,2.15 ; 6.65,2.15 6.65,2.95 6.85,2.95 6.85,2.15 ; -10.2,-2.15 -10.2,-0.85 -9.6,-0.85 -9.6,2.15 9.6,2.15 9.6,-0.85 10.2,-0.85 10.2,-2.15 -10.2,-2.15
Top Courtyard:
  lines w0.05: -0.5,0 0.5,0 ; 0,-0.5 0,0.5 ; -10.475,-2.425 10.475,-2.425 10.475,3.36 -10.475,3.36 -10.475,-2.425
3D body "68712814022.stp": height 2.1, standoff 0, extent -10.2,-2.15 10.2,2.95

## 68712814522 [mm] "ZIF Connectors, Horizontal, Bottom Contact, pitch 0.5mm, 28p"
height 2.25
pads (30):
  rect 0.3x1.2 smd: 1(-6.75,2.56) 2(-6.25,2.56) 3(-5.75,2.56) 4(-5.25,2.56) 5(-4.75,2.56) 6(-4.25,2.56) 7(-3.75,2.56) 8(-3.25,2.56) 9(-2.75,2.56) 10(-2.25,2.56) 11(-1.75,2.56) 12(-1.25,2.56) 13(-0.75,2.56) 14(-0.25,2.56) 15(0.25,2.56) 16(0.75,2.56) 17(1.25,2.56) 18(1.75,2.56) 19(2.25,2.56) 20(2.75,2.56) 21(3.25,2.56) 22(3.75,2.56) 23(4.25,2.56) 24(4.75,2.56) 25(5.25,2.56) 26(5.75,2.56) 27(6.25,2.56) 28(6.75,2.56)
  rect 2.7x3 smd: M1(-8.68,0.7) M2(8.68,0.7)
Top Overlay:
  circle w0.25: c-7.4,2.7 r0.125
  lines w0.2: -10.275,-1.125 -10.275,-2.225 10.275,-2.225 10.275,-1.125
Top Designator:
  text ".Designator" at -7.498,-0.5 h1.5
Top Component Outline:
  lines w0.1: -6.85,2.15 -6.85,2.95 -6.65,2.95 -6.65,2.15 ; -6.35,2.15 -6.35,2.95 -6.15,2.95 -6.15,2.15 ; -5.85,2.15 -5.85,2.95 -5.65,2.95 -5.65,2.15 ; -5.35,2.15 -5.35,2.95 -5.15,2.95 -5.15,2.15 ; -4.85,2.15 -4.85,2.95 -4.65,2.95 -4.65,2.15 ; -4.35,2.15 -4.35,2.95 -4.15,2.95 -4.15,2.15 ; -3.85,2.15 -3.85,2.95 -3.65,2.95 -3.65,2.15 ; -3.35,2.15 -3.35,2.95 -3.15,2.95 -3.15,2.15 ; -2.85,2.15 -2.85,2.95 -2.65,2.95 -2.65,2.15 ; -2.35,2.15 -2.35,2.95 -2.15,2.95 -2.15,2.15 ; -1.85,2.15 -1.85,2.95 -1.65,2.95 -1.65,2.15 ; -1.35,2.15 -1.35,2.95 -1.15,2.95 -1.15,2.15 ; -0.85,2.15 -0.85,2.95 -0.65,2.95 -0.65,2.15 ; -0.35,2.15 -0.35,2.95 -0.15,2.95 -0.15,2.15 ; 0.15,2.15 0.15,2.95 0.35,2.95 0.35,2.15 ; 0.65,2.15 0.65,2.95 0.85,2.95 0.85,2.15 ; 1.15,2.15 1.15,2.95 1.35,2.95 1.35,2.15 ; 1.65,2.15 1.65,2.95 1.85,2.95 1.85,2.15 ; 2.15,2.15 2.15,2.95 2.35,2.95 2.35,2.15 ; 2.65,2.15 2.65,2.95 2.85,2.95 2.85,2.15 ; 3.15,2.15 3.15,2.95 3.35,2.95 3.35,2.15 ; 3.65,2.15 3.65,2.95 3.85,2.95 3.85,2.15 ; 4.15,2.15 4.15,2.95 4.35,2.95 4.35,2.15 ; 4.65,2.15 4.65,2.95 4.85,2.95 4.85,2.15 ; 5.15,2.15 5.15,2.95 5.35,2.95 5.35,2.15 ; 5.65,2.15 5.65,2.95 5.85,2.95 5.85,2.15 ; 6.15,2.15 6.15,2.95 6.35,2.95 6.35,2.15 ; 6.65,2.15 6.65,2.95 6.85,2.95 6.85,2.15 ; -10.2,-2.15 -10.2,-0.85 -9.6,-0.85 -9.6,2.15 9.6,2.15 9.6,-0.85 10.2,-0.85 10.2,-2.15 -10.2,-2.15
Top 3D Body:
  lines w0.1: -6.85,2.15 -6.85,2.95 -6.65,2.95 -6.65,2.15 ; -6.35,2.15 -6.35,2.95 -6.15,2.95 -6.15,2.15 ; -5.85,2.15 -5.85,2.95 -5.65,2.95 -5.65,2.15 ; -5.35,2.15 -5.35,2.95 -5.15,2.95 -5.15,2.15 ; -4.85,2.15 -4.85,2.95 -4.65,2.95 -4.65,2.15 ; -4.35,2.15 -4.35,2.95 -4.15,2.95 -4.15,2.15 ; -3.85,2.15 -3.85,2.95 -3.65,2.95 -3.65,2.15 ; -3.35,2.15 -3.35,2.95 -3.15,2.95 -3.15,2.15 ; -2.85,2.15 -2.85,2.95 -2.65,2.95 -2.65,2.15 ; -2.35,2.15 -2.35,2.95 -2.15,2.95 -2.15,2.15 ; -1.85,2.15 -1.85,2.95 -1.65,2.95 -1.65,2.15 ; -1.35,2.15 -1.35,2.95 -1.15,2.95 -1.15,2.15 ; -0.85,2.15 -0.85,2.95 -0.65,2.95 -0.65,2.15 ; -0.35,2.15 -0.35,2.95 -0.15,2.95 -0.15,2.15 ; 0.15,2.15 0.15,2.95 0.35,2.95 0.35,2.15 ; 0.65,2.15 0.65,2.95 0.85,2.95 0.85,2.15 ; 1.15,2.15 1.15,2.95 1.35,2.95 1.35,2.15 ; 1.65,2.15 1.65,2.95 1.85,2.95 1.85,2.15 ; 2.15,2.15 2.15,2.95 2.35,2.95 2.35,2.15 ; 2.65,2.15 2.65,2.95 2.85,2.95 2.85,2.15 ; 3.15,2.15 3.15,2.95 3.35,2.95 3.35,2.15 ; 3.65,2.15 3.65,2.95 3.85,2.95 3.85,2.15 ; 4.15,2.15 4.15,2.95 4.35,2.95 4.35,2.15 ; 4.65,2.15 4.65,2.95 4.85,2.95 4.85,2.15 ; 5.15,2.15 5.15,2.95 5.35,2.95 5.35,2.15 ; 5.65,2.15 5.65,2.95 5.85,2.95 5.85,2.15 ; 6.15,2.15 6.15,2.95 6.35,2.95 6.35,2.15 ; 6.65,2.15 6.65,2.95 6.85,2.95 6.85,2.15 ; -10.2,-2.15 10.2,-2.15 10.2,-0.85 9.6,-0.85 9.6,2.15 -9.6,2.15 -9.6,-0.85 -10.2,-0.85 -10.2,-2.15
Top Courtyard:
  lines w0.05: -0.5,0 0.5,0 ; 0,-0.5 0,0.5 ; -10.475,-2.425 10.475,-2.425 10.475,3.36 -10.475,3.36 -10.475,-2.425
3D body "68712814522.stp": height 2.1, standoff 0, extent -10.2,-2.15 10.2,2.95

## 68713014022 [mm] "ZIF Connectors, Horizontal, Top Contact, pitch 0.5mm, 30p"
height 2.25
pads (32):
  rect 0.3x1.2 smd: 1(-7.25,2.56) 2(-6.75,2.56) 3(-6.25,2.56) 4(-5.75,2.56) 5(-5.25,2.56) 6(-4.75,2.56) 7(-4.25,2.56) 8(-3.75,2.56) 9(-3.25,2.56) 10(-2.75,2.56) 11(-2.25,2.56) 12(-1.75,2.56) 13(-1.25,2.56) 14(-0.75,2.56) 15(-0.25,2.56) 16(0.25,2.56) 17(0.75,2.56) 18(1.25,2.56) 19(1.75,2.56) 20(2.25,2.56) 21(2.75,2.56) 22(3.25,2.56) 23(3.75,2.56) 24(4.25,2.56) 25(4.75,2.56) 26(5.25,2.56) 27(5.75,2.56) 28(6.25,2.56) 29(6.75,2.56) 30(7.25,2.56)
  rect 2.7x3 smd: M1(-9.18,0.7) M2(9.18,0.7)
Top Overlay:
  circle w0.25: c-7.95,2.8 r0.125
  lines w0.2: -10.775,-1.1 -10.775,-2.225 10.775,-2.225 10.775,-1.1
Top Designator:
  text ".Designator" at -7.498,-0.5 h1.5
Top Component Outline:
  lines w0.1: -7.35,2.15 -7.35,2.95 -7.15,2.95 -7.15,2.15 ; -6.85,2.15 -6.85,2.95 -6.65,2.95 -6.65,2.15 ; -6.35,2.15 -6.35,2.95 -6.15,2.95 -6.15,2.15 ; -5.85,2.15 -5.85,2.95 -5.65,2.95 -5.65,2.15 ; -5.35,2.15 -5.35,2.95 -5.15,2.95 -5.15,2.15 ; -4.85,2.15 -4.85,2.95 -4.65,2.95 -4.65,2.15 ; -4.35,2.15 -4.35,2.95 -4.15,2.95 -4.15,2.15 ; -3.85,2.15 -3.85,2.95 -3.65,2.95 -3.65,2.15 ; -3.35,2.15 -3.35,2.95 -3.15,2.95 -3.15,2.15 ; -2.85,2.15 -2.85,2.95 -2.65,2.95 -2.65,2.15 ; -2.35,2.15 -2.35,2.95 -2.15,2.95 -2.15,2.15 ; -1.85,2.15 -1.85,2.95 -1.65,2.95 -1.65,2.15 ; -1.35,2.15 -1.35,2.95 -1.15,2.95 -1.15,2.15 ; -0.85,2.15 -0.85,2.95 -0.65,2.95 -0.65,2.15 ; -0.35,2.15 -0.35,2.95 -0.15,2.95 -0.15,2.15 ; 0.15,2.15 0.15,2.95 0.35,2.95 0.35,2.15 ; 0.65,2.15 0.65,2.95 0.85,2.95 0.85,2.15 ; 1.15,2.15 1.15,2.95 1.35,2.95 1.35,2.15 ; 1.65,2.15 1.65,2.95 1.85,2.95 1.85,2.15 ; 2.15,2.15 2.15,2.95 2.35,2.95 2.35,2.15 ; 2.65,2.15 2.65,2.95 2.85,2.95 2.85,2.15 ; 3.15,2.15 3.15,2.95 3.35,2.95 3.35,2.15 ; 3.65,2.15 3.65,2.95 3.85,2.95 3.85,2.15 ; 4.15,2.15 4.15,2.95 4.35,2.95 4.35,2.15 ; 4.65,2.15 4.65,2.95 4.85,2.95 4.85,2.15 ; 5.15,2.15 5.15,2.95 5.35,2.95 5.35,2.15 ; 5.65,2.15 5.65,2.95 5.85,2.95 5.85,2.15 ; 6.15,2.15 6.15,2.95 6.35,2.95 6.35,2.15 ; 6.65,2.15 6.65,2.95 6.85,2.95 6.85,2.15 ; 7.15,2.15 7.15,2.95 7.35,2.95 7.35,2.15 ; -10.7,-2.15 10.7,-2.15 10.7,-0.85 10.1,-0.85 10.1,2.15 -10.1,2.15 -10.1,-0.85 -10.7,-0.85 -10.7,-2.15
Top 3D Body:
  lines w0.1: -7.35,2.15 -7.35,2.95 -7.15,2.95 -7.15,2.15 ; -6.85,2.15 -6.85,2.95 -6.65,2.95 -6.65,2.15 ; -6.35,2.15 -6.35,2.95 -6.15,2.95 -6.15,2.15 ; -5.85,2.15 -5.85,2.95 -5.65,2.95 -5.65,2.15 ; -5.35,2.15 -5.35,2.95 -5.15,2.95 -5.15,2.15 ; -4.85,2.15 -4.85,2.95 -4.65,2.95 -4.65,2.15 ; -4.35,2.15 -4.35,2.95 -4.15,2.95 -4.15,2.15 ; -3.85,2.15 -3.85,2.95 -3.65,2.95 -3.65,2.15 ; -3.35,2.15 -3.35,2.95 -3.15,2.95 -3.15,2.15 ; -2.85,2.15 -2.85,2.95 -2.65,2.95 -2.65,2.15 ; -2.35,2.15 -2.35,2.95 -2.15,2.95 -2.15,2.15 ; -1.85,2.15 -1.85,2.95 -1.65,2.95 -1.65,2.15 ; -1.35,2.15 -1.35,2.95 -1.15,2.95 -1.15,2.15 ; -0.85,2.15 -0.85,2.95 -0.65,2.95 -0.65,2.15 ; -0.35,2.15 -0.35,2.95 -0.15,2.95 -0.15,2.15 ; 0.15,2.15 0.15,2.95 0.35,2.95 0.35,2.15 ; 0.65,2.15 0.65,2.95 0.85,2.95 0.85,2.15 ; 1.15,2.15 1.15,2.95 1.35,2.95 1.35,2.15 ; 1.65,2.15 1.65,2.95 1.85,2.95 1.85,2.15 ; 2.15,2.15 2.15,2.95 2.35,2.95 2.35,2.15 ; 2.65,2.15 2.65,2.95 2.85,2.95 2.85,2.15 ; 3.15,2.15 3.15,2.95 3.35,2.95 3.35,2.15 ; 3.65,2.15 3.65,2.95 3.85,2.95 3.85,2.15 ; 4.15,2.15 4.15,2.95 4.35,2.95 4.35,2.15 ; 4.65,2.15 4.65,2.95 4.85,2.95 4.85,2.15 ; 5.15,2.15 5.15,2.95 5.35,2.95 5.35,2.15 ; 5.65,2.15 5.65,2.95 5.85,2.95 5.85,2.15 ; 6.15,2.15 6.15,2.95 6.35,2.95 6.35,2.15 ; 6.65,2.15 6.65,2.95 6.85,2.95 6.85,2.15 ; 7.15,2.15 7.15,2.95 7.35,2.95 7.35,2.15 ; -10.7,-2.15 -10.7,-0.85 -10.1,-0.85 -10.1,2.15 10.1,2.15 10.1,-0.85 10.7,-0.85 10.7,-2.15 -10.7,-2.15
Top Courtyard:
  lines w0.05: -0.5,0 0.5,0 ; 0,-0.5 0,0.5 ; -10.975,-2.425 10.975,-2.425 10.975,3.36 -10.975,3.36 -10.975,-2.425
3D body "68713014022.stp": height 2.1, standoff 0, extent -10.7,-2.15 10.7,2.95

## 68713014522 [mm] "ZIF Connectors, Horizontal, Bottom Contact, pitch 0.5mm, 30p"
height 2.25
pads (32):
  rect 0.3x1.2 smd: 1(-7.25,2.56) 2(-6.75,2.56) 3(-6.25,2.56) 4(-5.75,2.56) 5(-5.25,2.56) 6(-4.75,2.56) 7(-4.25,2.56) 8(-3.75,2.56) 9(-3.25,2.56) 10(-2.75,2.56) 11(-2.25,2.56) 12(-1.75,2.56) 13(-1.25,2.56) 14(-0.75,2.56) 15(-0.25,2.56) 16(0.25,2.56) 17(0.75,2.56) 18(1.25,2.56) 19(1.75,2.56) 20(2.25,2.56) 21(2.75,2.56) 22(3.25,2.56) 23(3.75,2.56) 24(4.25,2.56) 25(4.75,2.56) 26(5.25,2.56) 27(5.75,2.56) 28(6.25,2.56) 29(6.75,2.56) 30(7.25,2.56)
  rect 2.7x3 smd: M1(-9.18,0.7) M2(9.18,0.7)
Top Overlay:
  circle w0.25: c-7.9,2.7 r0.125
  lines w0.2: -10.775,-1.125 -10.775,-2.225 10.775,-2.225 10.775,-1.125
Top Designator:
  text ".Designator" at -7.498,-0.5 h1.5
Top Component Outline:
  lines w0.1: -7.35,2.15 -7.35,2.95 -7.15,2.95 -7.15,2.15 ; -6.85,2.15 -6.85,2.95 -6.65,2.95 -6.65,2.15 ; -6.35,2.15 -6.35,2.95 -6.15,2.95 -6.15,2.15 ; -5.85,2.15 -5.85,2.95 -5.65,2.95 -5.65,2.15 ; -5.35,2.15 -5.35,2.95 -5.15,2.95 -5.15,2.15 ; -4.85,2.15 -4.85,2.95 -4.65,2.95 -4.65,2.15 ; -4.35,2.15 -4.35,2.95 -4.15,2.95 -4.15,2.15 ; -3.85,2.15 -3.85,2.95 -3.65,2.95 -3.65,2.15 ; -3.35,2.15 -3.35,2.95 -3.15,2.95 -3.15,2.15 ; -2.85,2.15 -2.85,2.95 -2.65,2.95 -2.65,2.15 ; -2.35,2.15 -2.35,2.95 -2.15,2.95 -2.15,2.15 ; -1.85,2.15 -1.85,2.95 -1.65,2.95 -1.65,2.15 ; -1.35,2.15 -1.35,2.95 -1.15,2.95 -1.15,2.15 ; -0.85,2.15 -0.85,2.95 -0.65,2.95 -0.65,2.15 ; -0.35,2.15 -0.35,2.95 -0.15,2.95 -0.15,2.15 ; 0.15,2.15 0.15,2.95 0.35,2.95 0.35,2.15 ; 0.65,2.15 0.65,2.95 0.85,2.95 0.85,2.15 ; 1.15,2.15 1.15,2.95 1.35,2.95 1.35,2.15 ; 1.65,2.15 1.65,2.95 1.85,2.95 1.85,2.15 ; 2.15,2.15 2.15,2.95 2.35,2.95 2.35,2.15 ; 2.65,2.15 2.65,2.95 2.85,2.95 2.85,2.15 ; 3.15,2.15 3.15,2.95 3.35,2.95 3.35,2.15 ; 3.65,2.15 3.65,2.95 3.85,2.95 3.85,2.15 ; 4.15,2.15 4.15,2.95 4.35,2.95 4.35,2.15 ; 4.65,2.15 4.65,2.95 4.85,2.95 4.85,2.15 ; 5.15,2.15 5.15,2.95 5.35,2.95 5.35,2.15 ; 5.65,2.15 5.65,2.95 5.85,2.95 5.85,2.15 ; 6.15,2.15 6.15,2.95 6.35,2.95 6.35,2.15 ; 6.65,2.15 6.65,2.95 6.85,2.95 6.85,2.15 ; 7.15,2.15 7.15,2.95 7.35,2.95 7.35,2.15 ; -10.7,-2.15 -10.7,-0.85 -10.1,-0.85 -10.1,2.15 10.1,2.15 10.1,-0.85 10.7,-0.85 10.7,-2.15 -10.7,-2.15
Top 3D Body:
  lines w0.1: -7.35,2.15 -7.35,2.95 -7.15,2.95 -7.15,2.15 ; -6.85,2.15 -6.85,2.95 -6.65,2.95 -6.65,2.15 ; -6.35,2.15 -6.35,2.95 -6.15,2.95 -6.15,2.15 ; -5.85,2.15 -5.85,2.95 -5.65,2.95 -5.65,2.15 ; -5.35,2.15 -5.35,2.95 -5.15,2.95 -5.15,2.15 ; -4.85,2.15 -4.85,2.95 -4.65,2.95 -4.65,2.15 ; -4.35,2.15 -4.35,2.95 -4.15,2.95 -4.15,2.15 ; -3.85,2.15 -3.85,2.95 -3.65,2.95 -3.65,2.15 ; -3.35,2.15 -3.35,2.95 -3.15,2.95 -3.15,2.15 ; -2.85,2.15 -2.85,2.95 -2.65,2.95 -2.65,2.15 ; -2.35,2.15 -2.35,2.95 -2.15,2.95 -2.15,2.15 ; -1.85,2.15 -1.85,2.95 -1.65,2.95 -1.65,2.15 ; -1.35,2.15 -1.35,2.95 -1.15,2.95 -1.15,2.15 ; -0.85,2.15 -0.85,2.95 -0.65,2.95 -0.65,2.15 ; -0.35,2.15 -0.35,2.95 -0.15,2.95 -0.15,2.15 ; 0.15,2.15 0.15,2.95 0.35,2.95 0.35,2.15 ; 0.65,2.15 0.65,2.95 0.85,2.95 0.85,2.15 ; 1.15,2.15 1.15,2.95 1.35,2.95 1.35,2.15 ; 1.65,2.15 1.65,2.95 1.85,2.95 1.85,2.15 ; 2.15,2.15 2.15,2.95 2.35,2.95 2.35,2.15 ; 2.65,2.15 2.65,2.95 2.85,2.95 2.85,2.15 ; 3.15,2.15 3.15,2.95 3.35,2.95 3.35,2.15 ; 3.65,2.15 3.65,2.95 3.85,2.95 3.85,2.15 ; 4.15,2.15 4.15,2.95 4.35,2.95 4.35,2.15 ; 4.65,2.15 4.65,2.95 4.85,2.95 4.85,2.15 ; 5.15,2.15 5.15,2.95 5.35,2.95 5.35,2.15 ; 5.65,2.15 5.65,2.95 5.85,2.95 5.85,2.15 ; 6.15,2.15 6.15,2.95 6.35,2.95 6.35,2.15 ; 6.65,2.15 6.65,2.95 6.85,2.95 6.85,2.15 ; 7.15,2.15 7.15,2.95 7.35,2.95 7.35,2.15 ; -10.7,-2.15 10.7,-2.15 10.7,-0.85 10.1,-0.85 10.1,2.15 -10.1,2.15 -10.1,-0.85 -10.7,-0.85 -10.7,-2.15
Top Courtyard:
  lines w0.05: -0.5,0 0.5,0 ; 0,-0.5 0,0.5 ; -10.975,-2.425 10.975,-2.425 10.975,3.36 -10.975,3.36 -10.975,-2.425
3D body "68713014522.stp": height 2.1, standoff 0, extent -10.7,-2.15 10.7,2.95

## 68713214022 [mm] "ZIF Connectors, Horizontal, Top Contact, pitch 0.5mm, 32p"
height 2.25
pads (34):
  rect 0.3x1.2 smd: 1(-7.75,2.56) 2(-7.25,2.56) 3(-6.75,2.56) 4(-6.25,2.56) 5(-5.75,2.56) 6(-5.25,2.56) 7(-4.75,2.56) 8(-4.25,2.56) 9(-3.75,2.56) 10(-3.25,2.56) 11(-2.75,2.56) 12(-2.25,2.56) 13(-1.75,2.56) 14(-1.25,2.56) 15(-0.75,2.56) 16(-0.25,2.56) 17(0.25,2.56) 18(0.75,2.56) 19(1.25,2.56) 20(1.75,2.56) 21(2.25,2.56) 22(2.75,2.56) 23(3.25,2.56) 24(3.75,2.56) 25(4.25,2.56) 26(4.75,2.56) 27(5.25,2.56) 28(5.75,2.56) 29(6.25,2.56) 30(6.75,2.56) 31(7.25,2.56) 32(7.75,2.56)
  rect 2.7x3 smd: M1(-9.68,0.7) M2(9.68,0.7)
Top Overlay:
  circle w0.25: c-8.45,2.8 r0.125
  lines w0.2: -11.275,-1.1 -11.275,-2.225 11.275,-2.225 11.275,-1.1
Top Designator:
  text ".Designator" at -7.498,-0.5 h1.5
Top Component Outline:
  lines w0.1: -7.85,2.15 -7.85,2.95 -7.65,2.95 -7.65,2.15 ; -7.35,2.15 -7.35,2.95 -7.15,2.95 -7.15,2.15 ; -6.85,2.15 -6.85,2.95 -6.65,2.95 -6.65,2.15 ; -6.35,2.15 -6.35,2.95 -6.15,2.95 -6.15,2.15 ; -5.85,2.15 -5.85,2.95 -5.65,2.95 -5.65,2.15 ; -5.35,2.15 -5.35,2.95 -5.15,2.95 -5.15,2.15 ; -4.85,2.15 -4.85,2.95 -4.65,2.95 -4.65,2.15 ; -4.35,2.15 -4.35,2.95 -4.15,2.95 -4.15,2.15 ; -3.85,2.15 -3.85,2.95 -3.65,2.95 -3.65,2.15 ; -3.35,2.15 -3.35,2.95 -3.15,2.95 -3.15,2.15 ; -2.85,2.15 -2.85,2.95 -2.65,2.95 -2.65,2.15 ; -2.35,2.15 -2.35,2.95 -2.15,2.95 -2.15,2.15 ; -1.85,2.15 -1.85,2.95 -1.65,2.95 -1.65,2.15 ; -1.35,2.15 -1.35,2.95 -1.15,2.95 -1.15,2.15 ; -0.85,2.15 -0.85,2.95 -0.65,2.95 -0.65,2.15 ; -0.35,2.15 -0.35,2.95 -0.15,2.95 -0.15,2.15 ; 0.15,2.15 0.15,2.95 0.35,2.95 0.35,2.15 ; 0.65,2.15 0.65,2.95 0.85,2.95 0.85,2.15 ; 1.15,2.15 1.15,2.95 1.35,2.95 1.35,2.15 ; 1.65,2.15 1.65,2.95 1.85,2.95 1.85,2.15 ; 2.15,2.15 2.15,2.95 2.35,2.95 2.35,2.15 ; 2.65,2.15 2.65,2.95 2.85,2.95 2.85,2.15 ; 3.15,2.15 3.15,2.95 3.35,2.95 3.35,2.15 ; 3.65,2.15 3.65,2.95 3.85,2.95 3.85,2.15 ; 4.15,2.15 4.15,2.95 4.35,2.95 4.35,2.15 ; 4.65,2.15 4.65,2.95 4.85,2.95 4.85,2.15 ; 5.15,2.15 5.15,2.95 5.35,2.95 5.35,2.15 ; 5.65,2.15 5.65,2.95 5.85,2.95 5.85,2.15 ; 6.15,2.15 6.15,2.95 6.35,2.95 6.35,2.15 ; 6.65,2.15 6.65,2.95 6.85,2.95 6.85,2.15 ; 7.15,2.15 7.15,2.95 7.35,2.95 7.35,2.15 ; 7.65,2.15 7.65,2.95 7.85,2.95 7.85,2.15 ; -11.2,-2.15 -11.2,-0.85 -10.6,-0.85 -10.6,2.15 10.6,2.15 10.6,-0.85 11.2,-0.85 11.2,-2.15 -11.2,-2.15
Top 3D Body:
  lines w0.1: -7.85,2.15 -7.85,2.95 -7.65,2.95 -7.65,2.15 ; -7.35,2.15 -7.35,2.95 -7.15,2.95 -7.15,2.15 ; -6.85,2.15 -6.85,2.95 -6.65,2.95 -6.65,2.15 ; -6.35,2.15 -6.35,2.95 -6.15,2.95 -6.15,2.15 ; -5.85,2.15 -5.85,2.95 -5.65,2.95 -5.65,2.15 ; -5.35,2.15 -5.35,2.95 -5.15,2.95 -5.15,2.15 ; -4.85,2.15 -4.85,2.95 -4.65,2.95 -4.65,2.15 ; -4.35,2.15 -4.35,2.95 -4.15,2.95 -4.15,2.15 ; -3.85,2.15 -3.85,2.95 -3.65,2.95 -3.65,2.15 ; -3.35,2.15 -3.35,2.95 -3.15,2.95 -3.15,2.15 ; -2.85,2.15 -2.85,2.95 -2.65,2.95 -2.65,2.15 ; -2.35,2.15 -2.35,2.95 -2.15,2.95 -2.15,2.15 ; -1.85,2.15 -1.85,2.95 -1.65,2.95 -1.65,2.15 ; -1.35,2.15 -1.35,2.95 -1.15,2.95 -1.15,2.15 ; -0.85,2.15 -0.85,2.95 -0.65,2.95 -0.65,2.15 ; -0.35,2.15 -0.35,2.95 -0.15,2.95 -0.15,2.15 ; 0.15,2.15 0.15,2.95 0.35,2.95 0.35,2.15 ; 0.65,2.15 0.65,2.95 0.85,2.95 0.85,2.15 ; 1.15,2.15 1.15,2.95 1.35,2.95 1.35,2.15 ; 1.65,2.15 1.65,2.95 1.85,2.95 1.85,2.15 ; 2.15,2.15 2.15,2.95 2.35,2.95 2.35,2.15 ; 2.65,2.15 2.65,2.95 2.85,2.95 2.85,2.15 ; 3.15,2.15 3.15,2.95 3.35,2.95 3.35,2.15 ; 3.65,2.15 3.65,2.95 3.85,2.95 3.85,2.15 ; 4.15,2.15 4.15,2.95 4.35,2.95 4.35,2.15 ; 4.65,2.15 4.65,2.95 4.85,2.95 4.85,2.15 ; 5.15,2.15 5.15,2.95 5.35,2.95 5.35,2.15 ; 5.65,2.15 5.65,2.95 5.85,2.95 5.85,2.15 ; 6.15,2.15 6.15,2.95 6.35,2.95 6.35,2.15 ; 6.65,2.15 6.65,2.95 6.85,2.95 6.85,2.15 ; 7.15,2.15 7.15,2.95 7.35,2.95 7.35,2.15 ; 7.65,2.15 7.65,2.95 7.85,2.95 7.85,2.15 ; -11.2,-2.15 11.2,-2.15 11.2,-0.85 10.6,-0.85 10.6,2.15 -10.6,2.15 -10.6,-0.85 -11.2,-0.85 -11.2,-2.15
Top Courtyard:
  lines w0.05: -0.5,0 0.5,0 ; 0,-0.5 0,0.5 ; -11.475,-2.425 -11.475,3.36 11.475,3.36 11.475,-2.425 -11.475,-2.425
3D body "68713214022.stp": height 2.1, standoff 0, extent -11.2,-2.15 11.2,2.95

## 68713214522 [mm] "ZIF Connectors, Horizontal, Bottom Contact, pitch 0.5mm, 32p"
height 2.25
pads (34):
  rect 0.3x1.2 smd: 1(-7.75,2.56) 2(-7.25,2.56) 3(-6.75,2.56) 4(-6.25,2.56) 5(-5.75,2.56) 6(-5.25,2.56) 7(-4.75,2.56) 8(-4.25,2.56) 9(-3.75,2.56) 10(-3.25,2.56) 11(-2.75,2.56) 12(-2.25,2.56) 13(-1.75,2.56) 14(-1.25,2.56) 15(-0.75,2.56) 16(-0.25,2.56) 17(0.25,2.56) 18(0.75,2.56) 19(1.25,2.56) 20(1.75,2.56) 21(2.25,2.56) 22(2.75,2.56) 23(3.25,2.56) 24(3.75,2.56) 25(4.25,2.56) 26(4.75,2.56) 27(5.25,2.56) 28(5.75,2.56) 29(6.25,2.56) 30(6.75,2.56) 31(7.25,2.56) 32(7.75,2.56)
  rect 2.7x3 smd: M1(-9.68,0.7) M2(9.68,0.7)
Top Overlay:
  circle w0.25: c-8.4,2.7 r0.125
  lines w0.2: -11.275,-1.125 -11.275,-2.225 11.275,-2.225 11.275,-1.125
Top Designator:
  text ".Designator" at -7.498,-0.5 h1.5
Top Component Outline:
  lines w0.1: -7.85,2.15 -7.85,2.95 -7.65,2.95 -7.65,2.15 ; -7.35,2.15 -7.35,2.95 -7.15,2.95 -7.15,2.15 ; -6.85,2.15 -6.85,2.95 -6.65,2.95 -6.65,2.15 ; -6.35,2.15 -6.35,2.95 -6.15,2.95 -6.15,2.15 ; -5.85,2.15 -5.85,2.95 -5.65,2.95 -5.65,2.15 ; -5.35,2.15 -5.35,2.95 -5.15,2.95 -5.15,2.15 ; -4.85,2.15 -4.85,2.95 -4.65,2.95 -4.65,2.15 ; -4.35,2.15 -4.35,2.95 -4.15,2.95 -4.15,2.15 ; -3.85,2.15 -3.85,2.95 -3.65,2.95 -3.65,2.15 ; -3.35,2.15 -3.35,2.95 -3.15,2.95 -3.15,2.15 ; -2.85,2.15 -2.85,2.95 -2.65,2.95 -2.65,2.15 ; -2.35,2.15 -2.35,2.95 -2.15,2.95 -2.15,2.15 ; -1.85,2.15 -1.85,2.95 -1.65,2.95 -1.65,2.15 ; -1.35,2.15 -1.35,2.95 -1.15,2.95 -1.15,2.15 ; -0.85,2.15 -0.85,2.95 -0.65,2.95 -0.65,2.15 ; -0.35,2.15 -0.35,2.95 -0.15,2.95 -0.15,2.15 ; 0.15,2.15 0.15,2.95 0.35,2.95 0.35,2.15 ; 0.65,2.15 0.65,2.95 0.85,2.95 0.85,2.15 ; 1.15,2.15 1.15,2.95 1.35,2.95 1.35,2.15 ; 1.65,2.15 1.65,2.95 1.85,2.95 1.85,2.15 ; 2.15,2.15 2.15,2.95 2.35,2.95 2.35,2.15 ; 2.65,2.15 2.65,2.95 2.85,2.95 2.85,2.15 ; 3.15,2.15 3.15,2.95 3.35,2.95 3.35,2.15 ; 3.65,2.15 3.65,2.95 3.85,2.95 3.85,2.15 ; 4.15,2.15 4.15,2.95 4.35,2.95 4.35,2.15 ; 4.65,2.15 4.65,2.95 4.85,2.95 4.85,2.15 ; 5.15,2.15 5.15,2.95 5.35,2.95 5.35,2.15 ; 5.65,2.15 5.65,2.95 5.85,2.95 5.85,2.15 ; 6.15,2.15 6.15,2.95 6.35,2.95 6.35,2.15 ; 6.65,2.15 6.65,2.95 6.85,2.95 6.85,2.15 ; 7.15,2.15 7.15,2.95 7.35,2.95 7.35,2.15 ; 7.65,2.15 7.65,2.95 7.85,2.95 7.85,2.15 ; -11.2,-2.15 11.2,-2.15 11.2,-0.85 10.6,-0.85 10.6,2.15 -10.6,2.15 -10.6,-0.85 -11.2,-0.85 -11.2,-2.15
Top 3D Body:
  lines w0.1: -7.85,2.15 -7.85,2.95 -7.65,2.95 -7.65,2.15 ; -7.35,2.15 -7.35,2.95 -7.15,2.95 -7.15,2.15 ; -6.85,2.15 -6.85,2.95 -6.65,2.95 -6.65,2.15 ; -6.35,2.15 -6.35,2.95 -6.15,2.95 -6.15,2.15 ; -5.85,2.15 -5.85,2.95 -5.65,2.95 -5.65,2.15 ; -5.35,2.15 -5.35,2.95 -5.15,2.95 -5.15,2.15 ; -4.85,2.15 -4.85,2.95 -4.65,2.95 -4.65,2.15 ; -4.35,2.15 -4.35,2.95 -4.15,2.95 -4.15,2.15 ; -3.85,2.15 -3.85,2.95 -3.65,2.95 -3.65,2.15 ; -3.35,2.15 -3.35,2.95 -3.15,2.95 -3.15,2.15 ; -2.85,2.15 -2.85,2.95 -2.65,2.95 -2.65,2.15 ; -2.35,2.15 -2.35,2.95 -2.15,2.95 -2.15,2.15 ; -1.85,2.15 -1.85,2.95 -1.65,2.95 -1.65,2.15 ; -1.35,2.15 -1.35,2.95 -1.15,2.95 -1.15,2.15 ; -0.85,2.15 -0.85,2.95 -0.65,2.95 -0.65,2.15 ; -0.35,2.15 -0.35,2.95 -0.15,2.95 -0.15,2.15 ; 0.15,2.15 0.15,2.95 0.35,2.95 0.35,2.15 ; 0.65,2.15 0.65,2.95 0.85,2.95 0.85,2.15 ; 1.15,2.15 1.15,2.95 1.35,2.95 1.35,2.15 ; 1.65,2.15 1.65,2.95 1.85,2.95 1.85,2.15 ; 2.15,2.15 2.15,2.95 2.35,2.95 2.35,2.15 ; 2.65,2.15 2.65,2.95 2.85,2.95 2.85,2.15 ; 3.15,2.15 3.15,2.95 3.35,2.95 3.35,2.15 ; 3.65,2.15 3.65,2.95 3.85,2.95 3.85,2.15 ; 4.15,2.15 4.15,2.95 4.35,2.95 4.35,2.15 ; 4.65,2.15 4.65,2.95 4.85,2.95 4.85,2.15 ; 5.15,2.15 5.15,2.95 5.35,2.95 5.35,2.15 ; 5.65,2.15 5.65,2.95 5.85,2.95 5.85,2.15 ; 6.15,2.15 6.15,2.95 6.35,2.95 6.35,2.15 ; 6.65,2.15 6.65,2.95 6.85,2.95 6.85,2.15 ; 7.15,2.15 7.15,2.95 7.35,2.95 7.35,2.15 ; 7.65,2.15 7.65,2.95 7.85,2.95 7.85,2.15 ; -11.2,-2.15 -11.2,-0.85 -10.6,-0.85 -10.6,2.15 10.6,2.15 10.6,-0.85 11.2,-0.85 11.2,-2.15 -11.2,-2.15
Top Courtyard:
  lines w0.05: -0.5,0 0.5,0 ; 0,-0.5 0,0.5 ; -11.475,-2.425 -11.475,3.36 11.475,3.36 11.475,-2.425 -11.475,-2.425
3D body "68713214522.stp": height 2.1, standoff 0, extent -11.2,-2.15 11.2,2.95